# Altium footprint library laboE_altium.PcbLib: 676 footprints (part 19 of 43)
Each footprint in its own frame and in the unit in brackets; x right, y up, seen from the top. Pads: shape width x height; smd on the part's side, far side on the other; paste and mask are expansions set on the pad; w line width, h text height; cw(c..) or ccw(c..) is an arc to the next point about the centre after c.
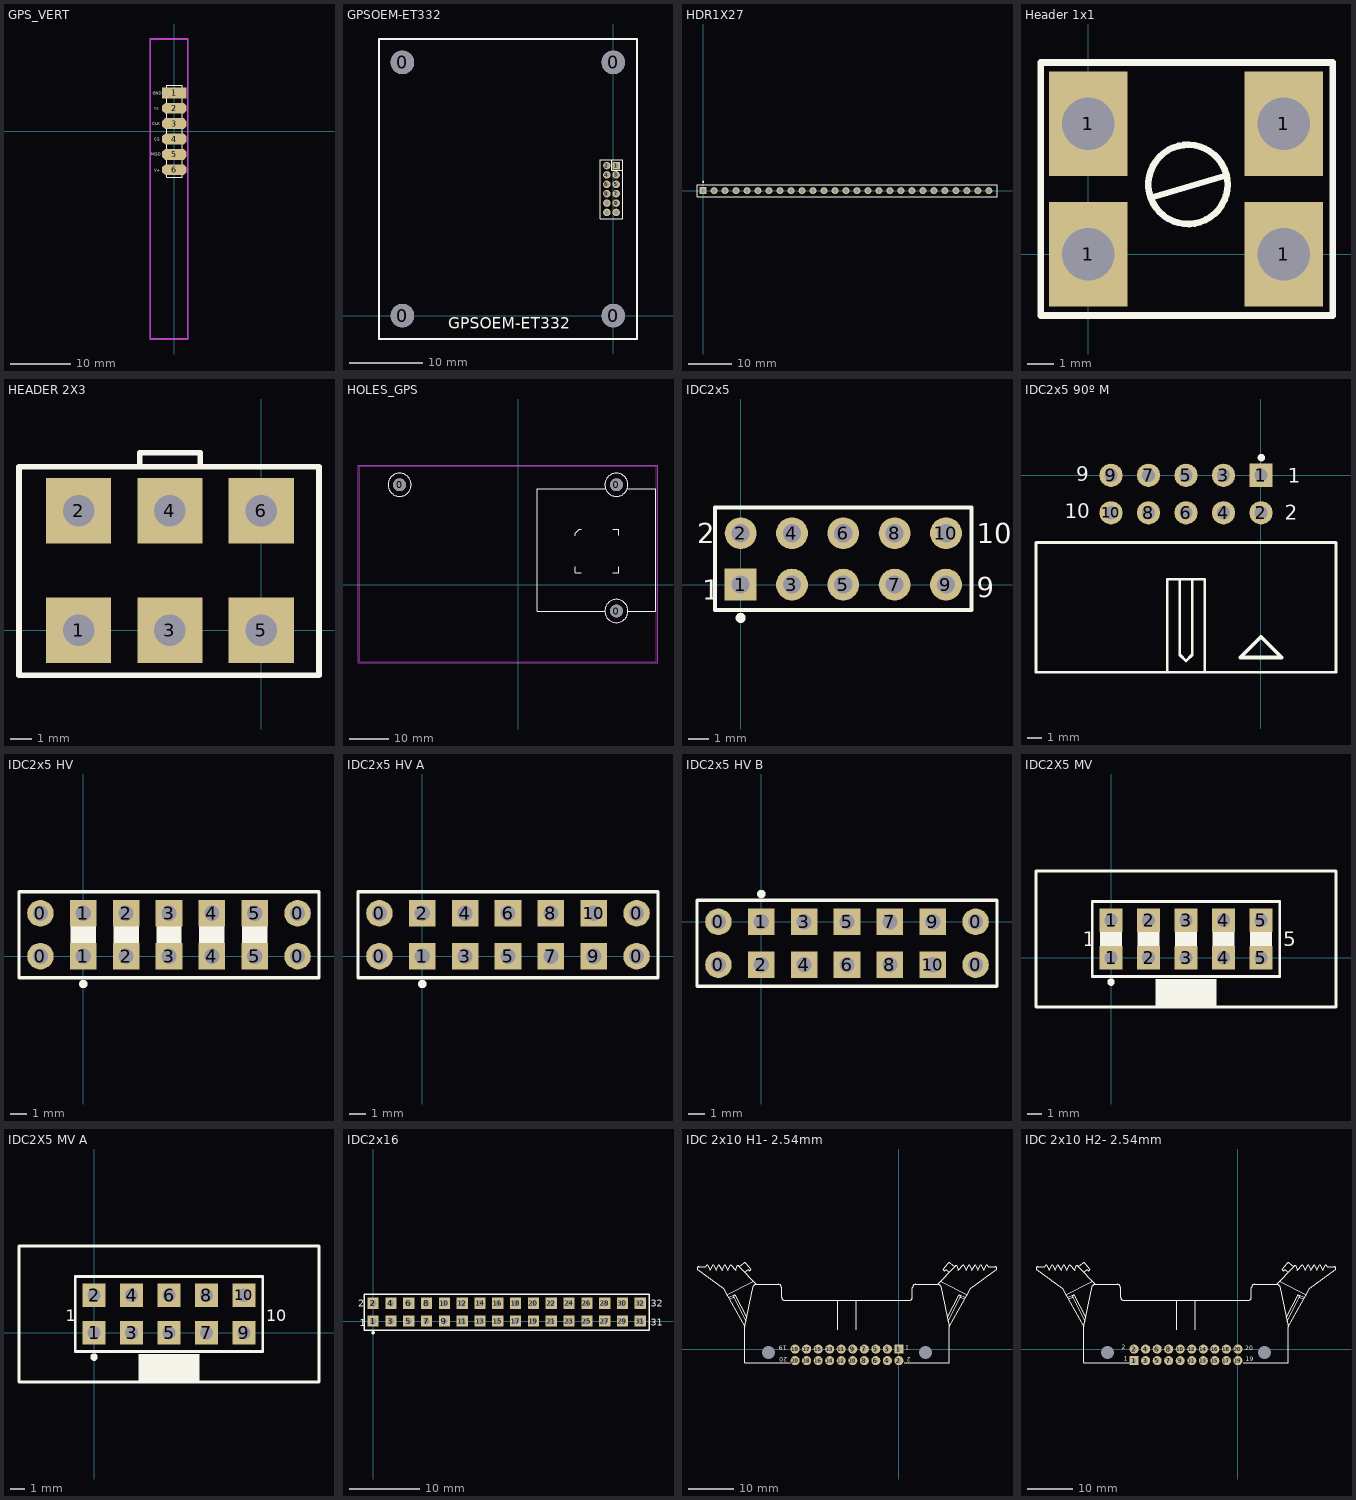
[diagram p18: the footprints below, top view; thin cyan lines are the x and y axes]

## GPS_VERT [mm]
pads (6):
  rect 4x1.8 hole 0.2: 1(0,6.35)
  oct 4x1.8 hole 0.25: 2(0,3.81) 3(0,1.27) 4(0,-1.27) 5(0,-3.81) 6(0,-6.35)
Top Overlay:
  lines w0.2: -1.27,-7.62 -1.27,7.62 1.27,7.62 1.27,-7.62 -1.27,-7.62
  text "GND" at -3.581,6.045 h0.5
  text "nc" at -3.353,3.581 h0.5
  text "CLK" at -3.683,0.991 h0.5
  text "CS" at -3.277,-1.524 h0.5
  text "MISO" at -3.861,-4.039 h0.5
  text "V+" at -3.277,-6.706 h0.5
Mechanical 1 keep-out:
  lines w0.254: -3.988,-34.29 2.235,-34.29 2.235,15.24 -3.988,15.24 -3.988,-34.29
3D body: height 2, standoff 0.2, extent -1.25,0.025 1.25,7.6
3D body: height 2, standoff 0.2, extent -1.25,-7.595 1.25,-0.02
3D body: height 10, standoff -1, extent -0.399,5.95 0.399,6.747
3D body: height 10, standoff -1, extent -0.399,3.41 0.399,4.207
3D body: height 10, standoff -1, extent -0.399,0.87 0.399,1.667
3D body: height 10, standoff -1, extent -0.399,-1.67 0.399,-0.873
3D body: height 10, standoff -1, extent -0.399,-4.21 0.399,-3.413
3D body: height 10, standoff -1, extent -0.399,-6.75 0.399,-5.953

## GPSOEM-ET332 [mil] "GPS"
pads (16):
  round 125 hole 125: 0(-1125,0) 0(-1125,1350) 0(0,0) 0(0,1350)
  rect 40x40 hole 25.59: 1(15,800)
  round 40 hole 25.59: 2(-35,800) 3(15,750) 4(-35,750) 5(15,700) 6(-35,700) 7(15,650) 8(-35,650) 9(15,600) 10(-35,600) 11(15,550) 12(-35,550)
Top Overlay:
  lines w5: -10,830 -10,775 50,775 ; -70,515 50,515 50,830 -70,830 -70,515
  lines w10: -1249.02,-125 125,-125 125,1475 -1249.02,1475 -1249.02,-125
  text "GPSOEM-ET332" at -880,-70 h60

## HDR1X27 [mm]
pads (27):
  rect 1.6x1.6 hole 0.99: 1(0,0)
  round 1.6 hole 0.99: 2(2.54,0) 3(5.08,0) 4(7.62,0) 5(10.16,0) 6(12.7,0) 7(15.24,0) 8(17.78,0) 9(20.32,0) 10(22.86,0) 11(25.4,0) 12(27.94,0) 13(30.48,0) 14(33.02,0) 15(35.56,0) 16(38.1,0) 17(40.64,0) 18(43.18,0) 19(45.72,0) 20(48.26,0) 21(50.8,0) 22(53.34,0) 23(55.88,0) 24(58.42,0) 25(60.96,0) 26(63.5,0) 27(66.04,0)
Top Overlay:
  circle w0.25: c0,2.05 r0.125
  lines w0.2: -1.4,-1.4 67.92,-1.4 67.92,1.4 -1.4,1.4 -1.4,-1.4

## Header 1x1 [mm]
pads (4):
  rect 3x4 hole 2: 1(0,0) 1(0,5) 1(7.5,0) 1(7.5,5)
Top Overlay:
  circle w0.254: c3.825,2.675 r1.519
  lines w0.254: 2.425,2.175 5.225,3 ; -1.825,-2.35 -1.825,7.35 9.375,7.35 9.375,-2.35 -1.825,-2.35
3D body: height 6, standoff 0, extent -1.15,-2.4 1.25,7.475
3D body: height 6, standoff 0, extent 6.375,-2.4 8.775,7.475
3D body: height 7, standoff 6, extent -1.15,-2.4 8.775,7.475
3D body: height 8, standoff 7, extent 1.828,0.541 5.812,4.534

## HEADER 2X3 [mm] "HEADER 2X3V 4,2mm"
pads (6):
  rect 3x3 hole 1.45: 1(-8.4,0) 2(-8.4,5.5) 3(-4.2,0) 4(-4.2,5.5) 5(0,0) 6(0,5.5)
Top Overlay:
  lines w0.254: -5.588,7.532 -5.588,8.167 -2.794,8.167 -2.794,7.532 ; -11.142,-2.068 -11.142,7.532 2.658,7.532 2.658,-2.068 -11.142,-2.068

## HOLES_GPS [mm]
pads (3):
  round 3.25 hole 3.25: 0(-30.15,25.298) 0(24.841,-6.706) 0(24.841,25.298)
Top Overlay:
  circle w0.254: c-30.15,25.298 r2.921
  circle w0.254: c24.841,25.298 r2.921
  circle w0.254: c24.841,-6.706 r2.921
  lines w0.2: 14.408,4.463 14.408,2.963 15.958,2.963 ; 14.408,12.413 14.408,13.013 15.358,13.963 15.958,13.963 ; 23.908,13.963 25.458,13.963 25.458,12.463 ; 23.958,2.963 25.458,2.963 25.458,4.513
  lines w0.254: 21.92,-6.706 4.775,-6.706 4.775,24.028 4.775,24.282 22.047,24.282 ; 27.635,24.282 34.874,24.282 34.874,-6.706 27.762,-6.706
Keep-Out Layer:
  circle w0.254: c-30.15,25.298 r2.921
  circle w0.254: c24.841,25.298 r2.921
  circle w0.254: c24.841,-6.706 r2.921
  lines w0.254: -40.31,-19.533 35.001,-19.533 35.001,29.997 -40.31,29.997 -40.31,-19.533
Mechanical 1:
  lines w0.254: -40.691,-19.787 -40.691,30.213 35.382,30.213 35.382,-19.787 -40.691,-19.787

## IDC2x5 [mil]
pads (10):
  rect 62x62 hole 35.43: 1(0,0)
  round 62 hole 35.43: 2(0,100) 3(100,0) 4(100,100) 5(200,0) 6(200,100) 7(300,0) 8(300,100) 9(400,0) 10(400,100)
Top Overlay:
  circle w9.84: c0.08,-65 r4.92
  lines w7.87: -50,-50 450,-50 450,150 -50,150 -50,-50
  text "2" at -85,80 h39.37
  text "1" at -75,-30 h39.37
  text "10" at 460,80 h39.37
  text "9" at 460,-25 h39.37

## IDC2x5 90º M [mil]
pads (10):
  rect 62x62 hole 35.43: 1(0,0)
  round 62 hole 35.43: 2(0,-100) 3(-100,0) 4(-100,-100) 5(-200,0) 6(-200,-100) 7(-300,0) 8(-300,-100) 9(-400,0) 10(-400,-100)
Top Overlay:
  circle w9.84: c0.98,47.24 r4.92
  lines w7.87: -600,-525 -600,-178.74 200,-178.74 200,-525 ; -599.8,-525.2 199.8,-525.2 ; -250,-525.2 -250,-277.17 -150,-277.17 -150,-525.2 ; -216.67,-277.17 -216.67,-478.33 -200,-495 -183.33,-478.33 -183.33,-277.17
  lines w10: -55.12,-485.83 55.12,-485.83 0,-430.71 -55.12,-485.83
  text "9" at -492.13,-15.75 h39.37
  text "10" at -523.62,-114.17 h39.37
  text "1" at 70.87,-19.68 h39.37
  text "2" at 62.99,-118.11 h39.37

## IDC2x5 HV [mil]
pads (14):
  round 62 hole 35.43: 0(-100,0) 0(-100,100) 0(500,0) 0(500,100)
  rect 62x62 hole 35.43: 1(0,0) 1(0,100) 2(100,0) 2(100,100) 3(200,0) 3(200,100) 4(300,0) 4(300,100) 5(400,0) 5(400,100)
Top Overlay:
  circle w9.84: c0.08,-65 r4.92
  lines w7.87: -150,-50 550,-50 550,150 -150,150 -150,-50
  lines w59.06: 0,0 0,100 ; 100,0 100,100 ; 200,0 200,100 ; 300,0 300,100 ; 400,0 400,100

## IDC2x5 HV A [mil]
pads (14):
  round 62 hole 35.43: 0(-100,0) 0(-100,100) 0(500,0) 0(500,100)
  rect 62x62 hole 35.43: 1(0,0) 2(0,100) 3(100,0) 4(100,100) 5(200,0) 6(200,100) 7(300,0) 8(300,100) 9(400,0) 10(400,100)
Top Overlay:
  circle w9.84: c0.08,-65 r4.92
  lines w7.87: -150,-50 550,-50 550,150 -150,150 -150,-50

## IDC2x5 HV B [mil]
pads (14):
  round 62 hole 35.43: 0(-100,-100) 0(-100,0) 0(500,-100) 0(500,0)
  rect 62x62 hole 35.43: 1(0,0) 2(0,-100) 3(100,0) 4(100,-100) 5(200,0) 6(200,-100) 7(300,0) 8(300,-100) 9(400,0) 10(400,-100)
Top Overlay:
  circle w9.84: c0.08,65 r4.92
  lines w7.87: -150,-150 550,-150 550,50 -150,50 -150,-150

## IDC2X5 MV [mil]
pads (10):
  rect 62x62 hole 35.43: 1(0,0) 1(0,100) 2(100,0) 2(100,100) 3(200,0) 3(200,100) 4(300,0) 4(300,100) 5(400,0) 5(400,100)
Top Overlay:
  circle w9.84: c0.08,-65 r4.92
  rectangle: 119.29,-131.1 280.71,-56.3
  lines w7.87: -200,-131.1 600,-131.1 600,231.1 -200,231.1 -200,-131.1 ; -50,-50 -50,150 450,150 450,-50 -50,-50
  lines w59.06: 0,0 0,100 ; 100,0 100,100 ; 200,0 200,100 ; 300,0 300,100 ; 400,0 400,100
  text "5" at 460,30 h39.37
  text "1" at -75,30 h39.37

## IDC2X5 MV A [mil]
pads (10):
  rect 62x62 hole 35.43: 1(0,0) 2(0,100) 3(100,0) 4(100,100) 5(200,0) 6(200,100) 7(300,0) 8(300,100) 9(400,0) 10(400,100)
Top Overlay:
  circle w9.84: c0.08,-65 r4.92
  rectangle: 119.29,-131.1 280.71,-56.3
  lines w7.87: -200,-131.1 -200,231.1 600,231.1 600,-131.1 -200,-131.1 ; -50,-50 450,-50 450,150 -50,150 -50,-50
  text "1" at -75,30 h31.5
  text "10" at 460,30 h31.5

## IDC2x16 [mm]
pads (32):
  rect 1.6x1.6 hole 0.9: 1(0,0) 2(0,2.54) 3(2.54,0) 4(2.54,2.54) 5(5.08,0) 6(5.08,2.54) 7(7.62,0) 8(7.62,2.54) 9(10.16,0) 10(10.16,2.54) 11(12.7,0) 12(12.7,2.54) 13(15.24,0) 14(15.24,2.54) 15(17.78,0) 16(17.78,2.54) 17(20.32,0) 18(20.32,2.54) 19(22.86,0) 20(22.86,2.54) 21(25.4,0) 22(25.4,2.54) 23(27.94,0) 24(27.94,2.54) 25(30.48,0) 26(30.48,2.54) 27(33.02,0) 28(33.02,2.54) 29(35.56,0) 30(35.56,2.54) 31(38.1,0) 32(38.1,2.54)
Top Overlay:
  circle w0.25: c0.002,-1.651 r0.125
  lines w0.2: -1.27,-1.27 39.37,-1.27 39.37,3.81 -1.27,3.81 -1.27,-1.27
  text "31" at 39.624,-0.635 h1
  text "32" at 39.624,2.032 h1
  text "2" at -2.159,2.032 h1
  text "1" at -1.905,-0.762 h1

## IDC 2x10 H1- 2.54mm [mm] "Connector; IDC, Thru-Hole; 20 Position; Vertical; Pitch 2.54 mm; Body 45.00 x 8.5 x 23.30 mm (LxWxH), Locking levers"
pads (22):
  rect 2x2 hole 1: 1(0,0)
  round 2 hole 1: 2(0,-2.54) 3(-2.54,0) 4(-2.54,-2.54) 5(-5.08,0) 6(-5.08,-2.54) 7(-7.62,0) 8(-7.62,-2.54) 9(-10.16,0) 10(-10.16,-2.54) 11(-12.7,0) 12(-12.7,-2.54) 13(-15.24,0) 14(-15.24,-2.54) 15(-17.78,0) 16(-17.78,-2.54) 17(-20.32,0) 18(-20.32,-2.54) 19(-22.86,0) 20(-22.86,-2.54)
  round 2.5 hole 2.8 unplated: MH1(5.84,-0.74) MH2(-28.7,-0.74)
Top Overlay:
  lines w0.2: -37.599,11.452 -36.111,11.948 ; -37.371,11.107 -36.353,11.446 ; -33.968,16.928 -33.403,17.347 cw(c-33.267,16.957) -33,17.272 ccw(c-32.947,17.587) -32.628,17.607 -33.687,18.886 ccw(c-33.953,18.629) -34.102,18.968 -35.108,18.118 ; -33.683,6.172 -36.353,11.446 ; -33.536,6.925 -36.111,11.948 ; -32.05,14.934 -37.869,11.929 ; -31.437,14.263 -35.108,18.118 ; -31.43,14.26 -26.545,14.26 cw(c-26.545,13.56) -25.845,13.56 -25.845,11.46 ccw(c-25.145,11.46) -25.145,10.76 2.285,10.76 ccw(c2.285,11.46) 2.985,11.46 2.985,13.56 cw(c3.685,13.56) 3.685,14.26 8.57,14.26 ; -31.38,14.26 ccw(c-31.395,13.56) -32.04,13.832 -33.93,4.96 ; -23.97,-3.04 -33.93,-3.04 -33.93,4.96 ; -13.48,4.264 -13.48,10.76 ; -9.38,4.26 -9.38,10.76 ; 1.225,-3.04 11.07,-3.04 11.07,4.96 ; 8.52,14.26 cw(c8.535,13.56) 9.18,13.832 11.07,4.96 ; 8.577,14.263 12.248,18.118 ; 9.19,14.934 15.009,11.929 ; 10.676,6.925 13.251,11.948 ; 10.823,6.172 13.493,11.446 ; 11.108,16.928 10.543,17.347 ccw(c10.407,16.957) 10.14,17.272 cw(c10.087,17.587) 9.768,17.607 10.827,18.886 cw(c11.093,18.629) 11.242,18.968 12.248,18.118 ; 14.511,11.107 13.493,11.446 ; 14.739,11.452 13.251,11.948 ; -42.51,18.089 -42.254,18.56 ; -42.51,18.089 -42.254,18.56 ; -42.51,18.089 -44.121,18.089 ccw(c-44.121,17.75) -44.43,17.609 -38.675,13.384 -37.869,11.929 ; -42.254,18.56 -41.51,17.36 -40.91,18.56 -40.26,17.36 -39.64,18.56 -38.94,17.36 -38.39,18.56 -37.64,17.36 -37.01,18.56 -35.98,17.36 -35.573,18.324 cw(c-35.431,18.015) -35.108,18.118 ; -37.869,11.929 -33.93,4.96 ; -36.353,11.446 -36.111,11.948 ; 11.07,4.96 15.009,11.929 ; 12.248,18.118 cw(c12.571,18.015) 12.713,18.324 13.12,17.36 14.15,18.56 14.78,17.36 15.53,18.56 16.08,17.36 16.78,18.56 17.4,17.36 18.05,18.56 18.651,17.36 19.395,18.56 ; 13.251,11.948 13.493,11.446 ; 15.009,11.929 15.815,13.384 21.57,17.609 ccw(c21.261,17.75) 21.261,18.089 19.65,18.089 ; 19.395,18.56 19.65,18.089 ; 19.395,18.56 19.65,18.089
  text "2" at 2.642,-1.829 h1
  text "1" at 2.286,0.762 h1
  text "19" at -24.663,0.711 h1
  text "20" at -24.536,-1.829 h1

## IDC 2x10 H2- 2.54mm [mm]
pads (22):
  rect 2x2 hole 1: 1(-22.86,-2.54)
  round 2 hole 1: 2(-22.86,0) 3(-20.32,-2.54) 4(-20.32,0) 5(-17.78,-2.54) 6(-17.78,0) 7(-15.24,-2.54) 8(-15.24,0) 9(-12.7,-2.54) 10(-12.7,0) 11(-10.16,-2.54) 12(-10.16,0) 13(-7.62,-2.54) 14(-7.62,0) 15(-5.08,-2.54) 16(-5.08,0) 17(-2.54,-2.54) 18(-2.54,0) 19(0,-2.54) 20(0,0)
  round 2.5 hole 2.8 unplated: MH1(5.84,-0.74) MH2(-28.7,-0.74)
Top Overlay:
  lines w0.2: -37.599,11.452 -36.111,11.948 ; -37.371,11.107 -36.353,11.446 ; -33.968,16.928 -33.403,17.347 cw(c-33.267,16.957) -33,17.272 ccw(c-32.947,17.587) -32.628,17.607 -33.687,18.886 ccw(c-33.953,18.629) -34.102,18.968 -35.108,18.118 ; -33.683,6.172 -36.353,11.446 ; -33.536,6.925 -36.111,11.948 ; -32.05,14.934 -37.869,11.929 ; -31.437,14.263 -35.108,18.118 ; -31.43,14.26 -26.545,14.26 cw(c-26.545,13.56) -25.845,13.56 -25.845,11.46 ccw(c-25.145,11.46) -25.145,10.76 2.285,10.76 ccw(c2.285,11.46) 2.985,11.46 2.985,13.56 cw(c3.685,13.56) 3.685,14.26 8.57,14.26 ; -31.38,14.26 ccw(c-31.395,13.56) -32.04,13.832 -33.93,4.96 ; -23.97,-3.04 -33.93,-3.04 -33.93,4.96 ; -13.48,4.264 -13.48,10.76 ; -9.38,4.26 -9.38,10.76 ; 1.225,-3.04 11.07,-3.04 11.07,4.96 ; 8.52,14.26 cw(c8.535,13.56) 9.18,13.832 11.07,4.96 ; 8.577,14.263 12.248,18.118 ; 9.19,14.934 15.009,11.929 ; 10.676,6.925 13.251,11.948 ; 10.823,6.172 13.493,11.446 ; 11.108,16.928 10.543,17.347 ccw(c10.407,16.957) 10.14,17.272 cw(c10.087,17.587) 9.768,17.607 10.827,18.886 cw(c11.093,18.629) 11.242,18.968 12.248,18.118 ; 14.511,11.107 13.493,11.446 ; 14.739,11.452 13.251,11.948 ; -42.51,18.089 -44.121,18.089 ccw(c-44.121,17.75) -44.43,17.609 -38.675,13.384 -37.869,11.929 ; -42.51,18.089 -42.254,18.56 ; -42.51,18.089 -42.254,18.56 ; -42.254,18.56 -41.51,17.36 -40.91,18.56 -40.26,17.36 -39.64,18.56 -38.94,17.36 -38.39,18.56 -37.64,17.36 -37.01,18.56 -35.98,17.36 -35.573,18.324 cw(c-35.431,18.015) -35.108,18.118 ; -37.869,11.929 -33.93,4.96 ; -36.353,11.446 -36.111,11.948 ; 11.07,4.96 15.009,11.929 ; 12.248,18.118 cw(c12.571,18.015) 12.713,18.324 13.12,17.36 14.15,18.56 14.78,17.36 15.53,18.56 16.08,17.36 16.78,18.56 17.4,17.36 18.05,18.56 18.651,17.36 19.395,18.56 ; 13.251,11.948 13.493,11.446 ; 15.009,11.929 15.815,13.384 21.57,17.609 ccw(c21.261,17.75) 21.261,18.089 19.65,18.089 ; 19.395,18.56 19.65,18.089 ; 19.395,18.56 19.65,18.089
  text "20" at 1.651,-0.254 h1
  text "19" at 1.778,-2.667 h1
  text "1" at -25.146,-2.54 h1
  text "2" at -25.527,0 h1